# Altium schematic symbol library DMN3023L-7.SchLib: 1 symbol
Pins are listed as number, name and electrical type; pins without a type are passive.

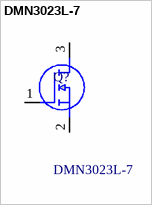
[diagram p0: symbol DMN3023L-7]

## DMN3023L-7
designator Q?
MOSFET N-Ch Enh Mode FET 30Vdss 20Vgss 51A; Manufacturer_Name: Diodes Incorporated; Geometry.Height: 1.1mm; Mouser Part Number: 621-DMN3023L-7; Mouser Price/Stock: https://www.mouser.co.uk/ProductDetail/Diodes-Incorporated/DMN3023L-7?qs=MNIFWdyJgbpS4HSLyrAo5g%3D%3D; Manufacturer_Part_Number: DMN3023L-7; Datasheet Link: https://www.diodes.com//assets/Datasheets/DMN3023L.pdf
footprint SOT96P240X110-3N
pins: 1 G, 2 S, 3 D